# Altium footprint library WCAP-AIG5.PcbLib: 22 footprints (part 1 of 2)
Each footprint in its own frame and in the unit in brackets; x right, y up, seen from the top. Pads: shape width x height; smd on the part's side, far side on the other; paste and mask are expansions set on the pad; w line width, h text height; cw(c..) or ccw(c..) is an arc to the next point about the centre after c.
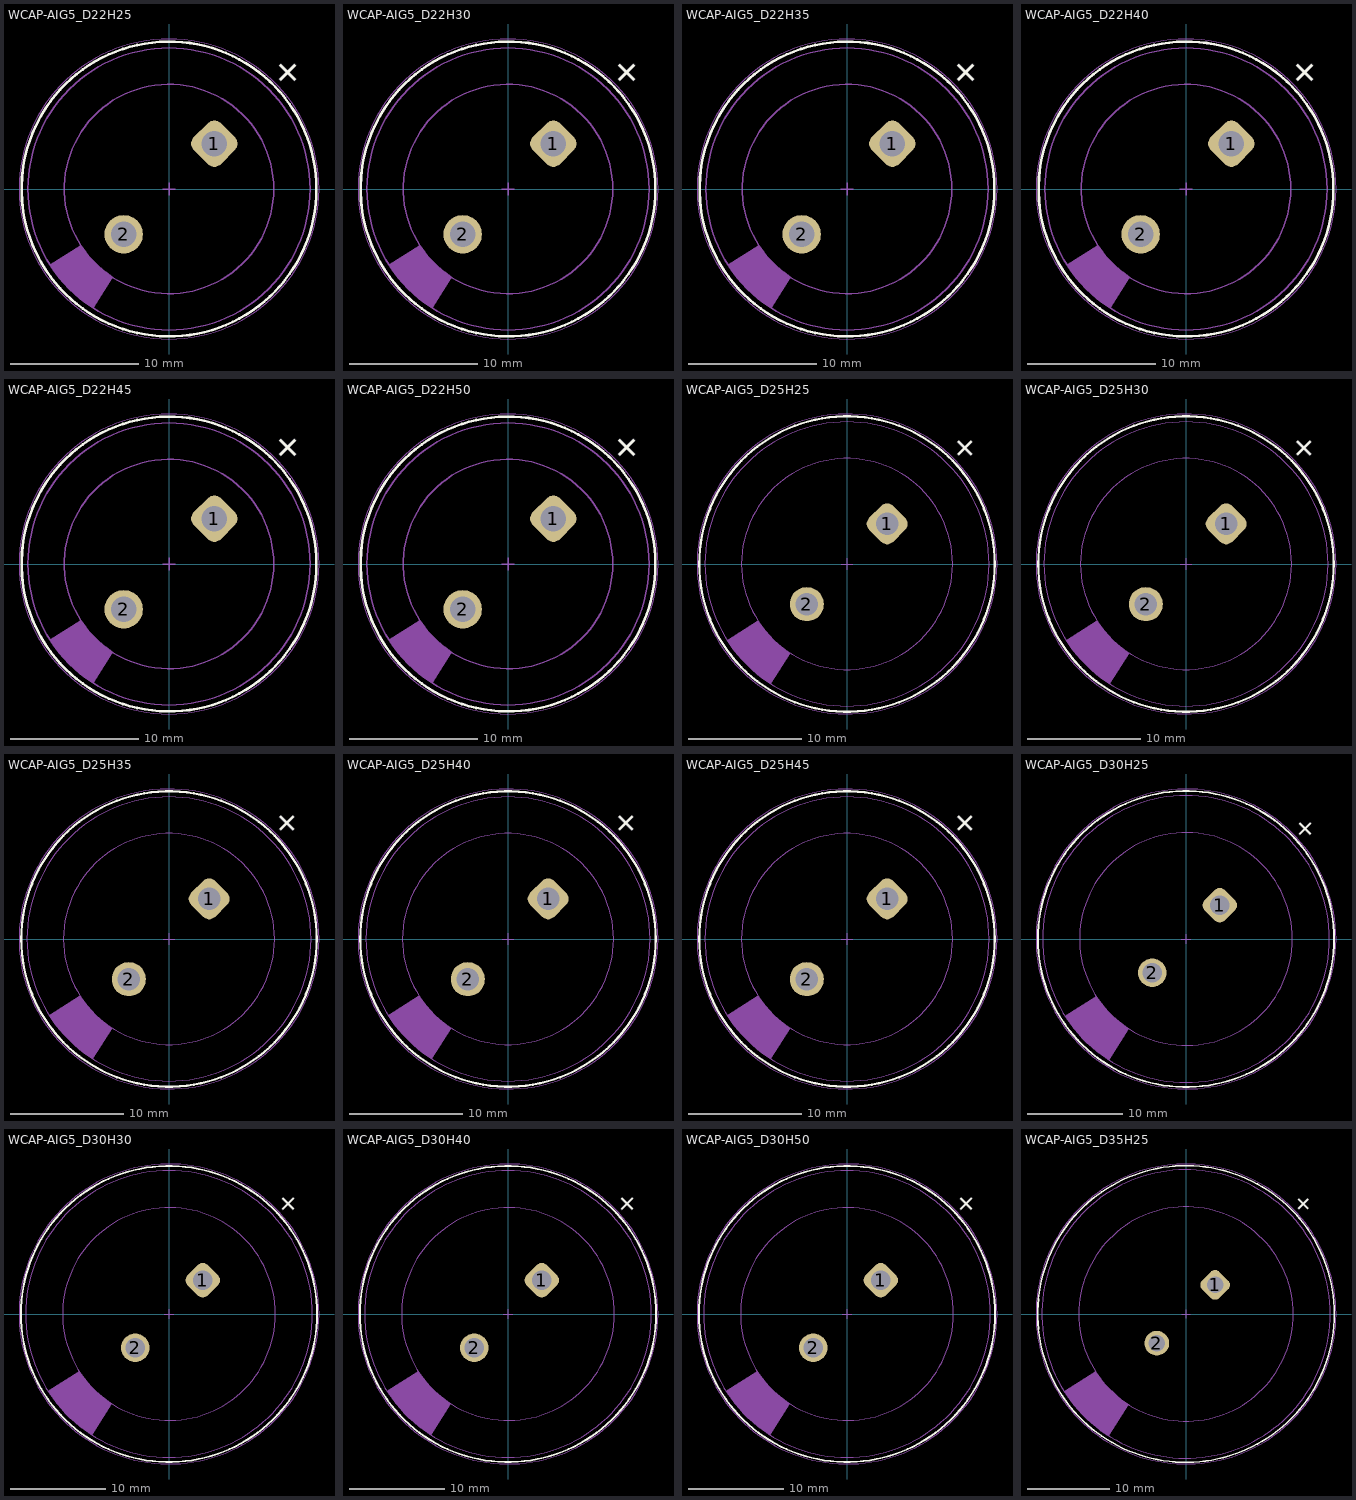
[diagram p0: the footprints below, top view; thin cyan lines are the x and y axes]

## WCAP-AIG5_D22H25 [mm] "Aluminium Electrolytic Snap-In Capacitors"
height 25
pads (2):
  rrect50% 3x3 hole 2 rot 45: 1(3.536,3.536)
  round 3 hole 2: 2(-3.536,-3.536)
Top Overlay:
  circle w0.2: c0,0 r11.5
  text "+" at 9.086,7.672 h2
Top Assembly:
  circle w0.1: c0,0 r11
  circle w0.1: c0,0 r8.17
  region: -5.901,-9.283 -4.381,-6.896 -4.383,-6.895 -4.754,-6.645 -5.452,-6.085 -6.085,-5.452 -6.645,-4.754 -6.895,-4.383 -6.896,-4.381 -9.283,-5.901 -9.121,-6.156 -8.771,-6.646 -8.394,-7.116 -7.991,-7.565 -7.565,-7.991 -7.116,-8.394 -6.646,-8.771 -6.156,-9.121
Top Designator:
  text ".Designator" at -3.647,-0.357 h1
Top 3D Body:
  circle w0.1: c0,0 r11
  circle w0.1: c0,0 r8.17
  region: -5.901,-9.283 -4.381,-6.896 -4.383,-6.895 -4.754,-6.645 -5.452,-6.085 -6.085,-5.452 -6.645,-4.754 -6.895,-4.383 -6.896,-4.381 -9.283,-5.901 -9.121,-6.156 -8.771,-6.646 -8.394,-7.116 -7.991,-7.565 -7.565,-7.991 -7.116,-8.394 -6.646,-8.771 -6.156,-9.121
Top Courtyard:
  circle w0.05: c0,0 r11.7
Top Component Center:
  lines w0.1: -0.5,0 0.5,0 ; 0,-0.5 0,0.5
3D body "WCAP-AIG5_22x25.stp": height 25.09, standoff -6.05, extent -10.995,-11.001 11,10.999

## WCAP-AIG5_D22H30 [mm] "Aluminium Electrolytic Snap-In Capacitors"
height 30
pads (2):
  rrect50% 3x3 hole 2 rot 45: 1(3.536,3.536)
  round 3 hole 2: 2(-3.536,-3.536)
Top Overlay:
  circle w0.2: c0,0 r11.5
  text "+" at 9.086,7.672 h2
Top Assembly:
  circle w0.1: c0,0 r8.17
  circle w0.1: c0,0 r11
  region: -5.901,-9.283 -4.381,-6.896 -4.383,-6.895 -4.754,-6.645 -5.452,-6.085 -6.085,-5.452 -6.645,-4.754 -6.895,-4.383 -6.896,-4.381 -9.283,-5.901 -9.121,-6.156 -8.771,-6.646 -8.394,-7.116 -7.991,-7.565 -7.565,-7.991 -7.116,-8.394 -6.646,-8.771 -6.156,-9.121
Top Designator:
  text ".Designator" at -3.647,-0.357 h1
Top 3D Body:
  circle w0.1: c0,0 r8.17
  circle w0.1: c0,0 r11
  region: -5.901,-9.283 -4.381,-6.896 -4.383,-6.895 -4.754,-6.645 -5.452,-6.085 -6.085,-5.452 -6.645,-4.754 -6.895,-4.383 -6.896,-4.381 -9.283,-5.901 -9.121,-6.156 -8.771,-6.646 -8.394,-7.116 -7.991,-7.565 -7.565,-7.991 -7.116,-8.394 -6.646,-8.771 -6.156,-9.121
Top Courtyard:
  circle w0.05: c0,0 r11.7
Top Component Center:
  lines w0.1: -0.5,0 0.5,0 ; 0,-0.5 0,0.5
3D body "22x30.stp": height 30.09, standoff -6.05, extent -10.999,-11.002 10.988,10.992

## WCAP-AIG5_D22H35 [mm] "Aluminium Electrolytic Snap-In Capacitors"
height 35
pads (2):
  rrect50% 3x3 hole 2 rot 45: 1(3.536,3.536)
  round 3 hole 2: 2(-3.536,-3.536)
Top Overlay:
  circle w0.2: c0,0 r11.5
  text "+" at 9.086,7.672 h2
Top Assembly:
  circle w0.1: c0,0 r11
  circle w0.1: c0,0 r8.17
  region: -5.901,-9.283 -4.381,-6.896 -4.383,-6.895 -4.754,-6.645 -5.452,-6.085 -6.085,-5.452 -6.645,-4.754 -6.895,-4.383 -6.896,-4.381 -9.283,-5.901 -9.121,-6.156 -8.771,-6.646 -8.394,-7.116 -7.991,-7.565 -7.565,-7.991 -7.116,-8.394 -6.646,-8.771 -6.156,-9.121
Top Designator:
  text ".Designator" at -3.647,-0.357 h1
Top 3D Body:
  circle w0.1: c0,0 r11
  circle w0.1: c0,0 r8.17
  region: -5.901,-9.283 -4.381,-6.896 -4.383,-6.895 -4.754,-6.645 -5.452,-6.085 -6.085,-5.452 -6.645,-4.754 -6.895,-4.383 -6.896,-4.381 -9.283,-5.901 -9.121,-6.156 -8.771,-6.646 -8.394,-7.116 -7.991,-7.565 -7.565,-7.991 -7.116,-8.394 -6.646,-8.771 -6.156,-9.121
Top Courtyard:
  circle w0.05: c0,0 r11.7
Top Component Center:
  lines w0.1: -0.5,0 0.5,0 ; 0,-0.5 0,0.5
3D body "WCAP-AIG5_22x35.stp": height 35.09, standoff -6.05, extent -10.988,-11.001 10.98,10.985

## WCAP-AIG5_D22H40 [mm] "Aluminium Electrolytic Snap-In Capacitors"
height 40
pads (2):
  rrect50% 3x3 hole 2 rot 45: 1(3.536,3.536)
  round 3 hole 2: 2(-3.536,-3.536)
Top Overlay:
  circle w0.2: c0,0 r11.5
  text "+" at 9.086,7.672 h2
Top Assembly:
  circle w0.1: c0,0 r11
  circle w0.1: c0,0 r8.17
  region: -5.901,-9.283 -4.381,-6.896 -4.383,-6.895 -4.754,-6.645 -5.452,-6.085 -6.085,-5.452 -6.645,-4.754 -6.895,-4.383 -6.896,-4.381 -9.283,-5.901 -9.121,-6.156 -8.771,-6.646 -8.394,-7.116 -7.991,-7.565 -7.565,-7.991 -7.116,-8.394 -6.646,-8.771 -6.156,-9.121
Top Designator:
  text ".Designator" at -3.647,-0.357 h1
Top 3D Body:
  circle w0.1: c0,0 r11
  circle w0.1: c0,0 r8.17
  region: -5.901,-9.283 -4.381,-6.896 -4.383,-6.895 -4.754,-6.645 -5.452,-6.085 -6.085,-5.452 -6.645,-4.754 -6.895,-4.383 -6.896,-4.381 -9.283,-5.901 -9.121,-6.156 -8.771,-6.646 -8.394,-7.116 -7.991,-7.565 -7.565,-7.991 -7.116,-8.394 -6.646,-8.771 -6.156,-9.121
Top Courtyard:
  circle w0.05: c0,0 r11.7
Top Component Center:
  lines w0.1: -0.5,0 0.5,0 ; 0,-0.5 0,0.5
3D body "WCAP-AIG5_22x40.stp": height 40.09, standoff -6.05, extent -10.99,-11 10.985,10.98

## WCAP-AIG5_D22H45 [mm] "Aluminium Electrolytic Snap-In Capacitors"
height 45
pads (2):
  rrect50% 3x3 hole 2 rot 45: 1(3.536,3.536)
  round 3 hole 2: 2(-3.536,-3.536)
Top Overlay:
  circle w0.2: c0,0 r11.5
  text "+" at 9.086,7.672 h2
Top Assembly:
  circle w0.1: c0,0 r8.17
  circle w0.1: c0,0 r11
  region: -5.901,-9.283 -4.381,-6.896 -4.383,-6.895 -4.754,-6.645 -5.452,-6.085 -6.085,-5.452 -6.645,-4.754 -6.895,-4.383 -6.896,-4.381 -9.283,-5.901 -9.121,-6.156 -8.771,-6.646 -8.394,-7.116 -7.991,-7.565 -7.565,-7.991 -7.116,-8.394 -6.646,-8.771 -6.156,-9.121
Top Designator:
  text ".Designator" at -3.647,-0.357 h1
Top 3D Body:
  circle w0.1: c0,0 r8.17
  circle w0.1: c0,0 r11
  region: -5.901,-9.283 -4.381,-6.896 -4.383,-6.895 -4.754,-6.645 -5.452,-6.085 -6.085,-5.452 -6.645,-4.754 -6.895,-4.383 -6.896,-4.381 -9.283,-5.901 -9.121,-6.156 -8.771,-6.646 -8.394,-7.116 -7.991,-7.565 -7.565,-7.991 -7.116,-8.394 -6.646,-8.771 -6.156,-9.121
Top Courtyard:
  circle w0.05: c0,0 r11.7
Top Component Center:
  lines w0.1: -0.5,0 0.5,0 ; 0,-0.5 0,0.5
3D body "22x45.stp": height 45.09, standoff -6.05, extent -10.998,-11 10.989,10.993

## WCAP-AIG5_D22H50 [mm] "Aluminium Electrolytic Snap-In Capacitors"
height 50
pads (2):
  rrect50% 3x3 hole 2 rot 45: 1(3.536,3.536)
  round 3 hole 2: 2(-3.536,-3.536)
Top Overlay:
  circle w0.2: c0,0 r11.5
  text "+" at 9.086,7.672 h2
Top Assembly:
  circle w0.1: c0,0 r8.17
  circle w0.1: c0,0 r11
  region: -5.901,-9.283 -4.381,-6.896 -4.383,-6.895 -4.754,-6.645 -5.452,-6.085 -6.085,-5.452 -6.645,-4.754 -6.895,-4.383 -6.896,-4.381 -9.283,-5.901 -9.121,-6.156 -8.771,-6.646 -8.394,-7.116 -7.991,-7.565 -7.565,-7.991 -7.116,-8.394 -6.646,-8.771 -6.156,-9.121
Top Designator:
  text ".Designator" at -3.647,-0.357 h1
Top 3D Body:
  circle w0.1: c0,0 r8.17
  circle w0.1: c0,0 r11
  region: -5.901,-9.283 -4.381,-6.896 -4.383,-6.895 -4.754,-6.645 -5.452,-6.085 -6.085,-5.452 -6.645,-4.754 -6.895,-4.383 -6.896,-4.381 -9.283,-5.901 -9.121,-6.156 -8.771,-6.646 -8.394,-7.116 -7.991,-7.565 -7.565,-7.991 -7.116,-8.394 -6.646,-8.771 -6.156,-9.121
Top Courtyard:
  circle w0.05: c0,0 r11.7
Top Component Center:
  lines w0.1: -0.5,0 0.5,0 ; 0,-0.5 0,0.5
3D body "22x50.stp": height 50.09, standoff -6.05, extent -11,-11.002 11,11

## WCAP-AIG5_D25H25 [mm] "Aluminium Electrolytic Snap-In Capacitors"
height 25
pads (2):
  rrect50% 3x3 hole 2 rot 45: 1(3.536,3.536)
  round 3 hole 2: 2(-3.536,-3.536)
Top Overlay:
  circle w0.2: c0,0 r13
  text "+" at 10.182,8.768 h2
Top Assembly:
  circle w0.1: c0,0 r9.29
  circle w0.1: c0,0 r12.5
  region: -6.717,-10.542 -4.978,-7.844 -4.983,-7.84 -5.196,-7.701 -5.61,-7.405 -6.007,-7.086 -6.387,-6.747 -6.747,-6.387 -7.086,-6.007 -7.405,-5.61 -7.701,-5.196 -7.84,-4.983 -7.844,-4.978 -10.542,-6.717 -10.359,-7.005 -9.962,-7.559 -9.535,-8.09 -9.08,-8.598 -8.598,-9.08 -8.09,-9.535 -7.559,-9.962 -7.005,-10.359
Top Designator:
  text ".Designator" at -3.647,-0.357 h1
Top 3D Body:
  circle w0.1: c0,0 r9.29
  circle w0.1: c0,0 r12.5
  region: -6.717,-10.542 -4.978,-7.844 -4.983,-7.84 -5.196,-7.701 -5.61,-7.405 -6.007,-7.086 -6.387,-6.747 -6.747,-6.387 -7.086,-6.007 -7.405,-5.61 -7.701,-5.196 -7.84,-4.983 -7.844,-4.978 -10.542,-6.717 -10.359,-7.005 -9.962,-7.559 -9.535,-8.09 -9.08,-8.598 -8.598,-9.08 -8.09,-9.535 -7.559,-9.962 -7.005,-10.359
Top Courtyard:
  circle w0.05: c0,0 r13.2
Top Component Center:
  lines w0.1: -0.5,0 0.5,0 ; 0,-0.5 0,0.5
3D body "WCAP-AIG5_25x25.stp": height 25.09, standoff -6.05, extent -12.494,-12.5 12.485,12.49

## WCAP-AIG5_D25H30 [mm] "Aluminium Electrolytic Snap-In Capacitors"
height 30
pads (2):
  rrect50% 3x3 hole 2 rot 45: 1(3.536,3.536)
  round 3 hole 2: 2(-3.536,-3.536)
Top Overlay:
  circle w0.2: c0,0 r13
  text "+" at 10.182,8.768 h2
Top Assembly:
  circle w0.1: c0,0 r12.5
  circle w0.1: c0,0 r9.29
  region: -6.717,-10.542 -4.978,-7.844 -4.983,-7.84 -5.196,-7.701 -5.61,-7.405 -6.007,-7.086 -6.387,-6.747 -6.747,-6.387 -7.086,-6.007 -7.405,-5.61 -7.701,-5.196 -7.84,-4.983 -7.844,-4.978 -10.542,-6.717 -10.359,-7.005 -9.962,-7.559 -9.535,-8.09 -9.08,-8.598 -8.598,-9.08 -8.09,-9.535 -7.559,-9.962 -7.005,-10.359
Top Designator:
  text ".Designator" at -3.647,-0.357 h1
Top 3D Body:
  circle w0.1: c0,0 r12.5
  circle w0.1: c0,0 r9.29
  region: -6.717,-10.542 -4.978,-7.844 -4.983,-7.84 -5.196,-7.701 -5.61,-7.405 -6.007,-7.086 -6.387,-6.747 -6.747,-6.387 -7.086,-6.007 -7.405,-5.61 -7.701,-5.196 -7.84,-4.983 -7.844,-4.978 -10.542,-6.717 -10.359,-7.005 -9.962,-7.559 -9.535,-8.09 -9.08,-8.598 -8.598,-9.08 -8.09,-9.535 -7.559,-9.962 -7.005,-10.359
Top Courtyard:
  circle w0.05: c0,0 r13.2
Top Component Center:
  lines w0.1: -0.5,0 0.5,0 ; 0,-0.5 0,0.5
3D body "25x30.stp": height 30.09, standoff -6.05, extent -12.494,-12.501 12.499,12.499

## WCAP-AIG5_D25H35 [mm] "Aluminium Electrolytic Snap-In Capacitors"
height 35
pads (2):
  rrect50% 3x3 hole 2 rot 45: 1(3.536,3.536)
  round 3 hole 2: 2(-3.536,-3.536)
Top Overlay:
  circle w0.2: c0,0 r13
  text "+" at 10.182,8.768 h2
Top Assembly:
  circle w0.1: c0,0 r12.5
  circle w0.1: c0,0 r9.29
  region: -6.717,-10.542 -4.978,-7.844 -4.983,-7.84 -5.196,-7.701 -5.61,-7.405 -6.007,-7.086 -6.387,-6.747 -6.747,-6.387 -7.086,-6.007 -7.405,-5.61 -7.701,-5.196 -7.84,-4.983 -7.844,-4.978 -10.542,-6.717 -10.359,-7.005 -9.962,-7.559 -9.535,-8.09 -9.08,-8.598 -8.598,-9.08 -8.09,-9.535 -7.559,-9.962 -7.005,-10.359
Top Designator:
  text ".Designator" at -3.647,-0.357 h1
Top 3D Body:
  circle w0.1: c0,0 r12.5
  circle w0.1: c0,0 r9.29
  region: -6.717,-10.542 -4.978,-7.844 -4.983,-7.84 -5.196,-7.701 -5.61,-7.405 -6.007,-7.086 -6.387,-6.747 -6.747,-6.387 -7.086,-6.007 -7.405,-5.61 -7.701,-5.196 -7.84,-4.983 -7.844,-4.978 -10.542,-6.717 -10.359,-7.005 -9.962,-7.559 -9.535,-8.09 -9.08,-8.598 -8.598,-9.08 -8.09,-9.535 -7.559,-9.962 -7.005,-10.359
Top Courtyard:
  circle w0.05: c0,0 r13.2
Top Component Center:
  lines w0.1: -0.5,0 0.5,0 ; 0,-0.5 0,0.5
3D body "25x35.stp": height 35.09, standoff -6.05, extent -12.5,-12.5 12.486,12.491

## WCAP-AIG5_D25H40 [mm] "Aluminium Electrolytic Snap-In Capacitors"
height 40
pads (2):
  rrect50% 3x3 hole 2 rot 45: 1(3.536,3.536)
  round 3 hole 2: 2(-3.536,-3.536)
Top Overlay:
  circle w0.2: c0,0 r13
  text "+" at 10.182,8.768 h2
Top Assembly:
  circle w0.1: c0,0 r12.5
  circle w0.1: c0,0 r9.29
  region: -6.717,-10.542 -4.978,-7.844 -4.983,-7.84 -5.196,-7.701 -5.61,-7.405 -6.007,-7.086 -6.387,-6.747 -6.747,-6.387 -7.086,-6.007 -7.405,-5.61 -7.701,-5.196 -7.84,-4.983 -7.844,-4.978 -10.542,-6.717 -10.359,-7.005 -9.962,-7.559 -9.535,-8.09 -9.08,-8.598 -8.598,-9.08 -8.09,-9.535 -7.559,-9.962 -7.005,-10.359
Top Designator:
  text ".Designator" at -3.647,-0.357 h1
Top 3D Body:
  circle w0.1: c0,0 r12.5
  circle w0.1: c0,0 r9.29
  region: -6.717,-10.542 -4.978,-7.844 -4.983,-7.84 -5.196,-7.701 -5.61,-7.405 -6.007,-7.086 -6.387,-6.747 -6.747,-6.387 -7.086,-6.007 -7.405,-5.61 -7.701,-5.196 -7.84,-4.983 -7.844,-4.978 -10.542,-6.717 -10.359,-7.005 -9.962,-7.559 -9.535,-8.09 -9.08,-8.598 -8.598,-9.08 -8.09,-9.535 -7.559,-9.962 -7.005,-10.359
Top Courtyard:
  circle w0.05: c0,0 r13.2
Top Component Center:
  lines w0.1: -0.5,0 0.5,0 ; 0,-0.5 0,0.5
3D body "25x40.stp": height 40.09, standoff -6.05, extent -12.487,-12.5 12.477,12.482

## WCAP-AIG5_D25H45 [mm] "Aluminium Electrolytic Snap-In Capacitors"
height 45
pads (2):
  rrect50% 3x3 hole 2 rot 45: 1(3.536,3.536)
  round 3 hole 2: 2(-3.536,-3.536)
Top Overlay:
  circle w0.2: c0,0 r13
  text "+" at 10.182,8.768 h2
Top Assembly:
  circle w0.1: c0,0 r9.29
  circle w0.1: c0,0 r12.5
  region: -6.717,-10.542 -4.978,-7.844 -4.983,-7.84 -5.196,-7.701 -5.61,-7.405 -6.007,-7.086 -6.387,-6.747 -6.747,-6.387 -7.086,-6.007 -7.405,-5.61 -7.701,-5.196 -7.84,-4.983 -7.844,-4.978 -10.542,-6.717 -10.359,-7.005 -9.962,-7.559 -9.535,-8.09 -9.08,-8.598 -8.598,-9.08 -8.09,-9.535 -7.559,-9.962 -7.005,-10.359
Top Designator:
  text ".Designator" at -3.647,-0.357 h1
Top 3D Body:
  circle w0.1: c0,0 r9.29
  circle w0.1: c0,0 r12.5
  region: -6.717,-10.542 -4.978,-7.844 -4.983,-7.84 -5.196,-7.701 -5.61,-7.405 -6.007,-7.086 -6.387,-6.747 -6.747,-6.387 -7.086,-6.007 -7.405,-5.61 -7.701,-5.196 -7.84,-4.983 -7.844,-4.978 -10.542,-6.717 -10.359,-7.005 -9.962,-7.559 -9.535,-8.09 -9.08,-8.598 -8.598,-9.08 -8.09,-9.535 -7.559,-9.962 -7.005,-10.359
Top Courtyard:
  circle w0.05: c0,0 r13.2
Top Component Center:
  lines w0.1: -0.5,0 0.5,0 ; 0,-0.5 0,0.5
3D body "25x45.stp": height 45.09, standoff -6.05, extent -12.482,-12.501 12.494,12.497

## WCAP-AIG5_D30H25 [mm] "Aluminium Electrolytic Snap-In Capacitors"
height 25
pads (2):
  rrect50% 3x3 hole 2 rot 45: 1(3.536,3.536)
  round 3 hole 2: 2(-3.536,-3.536)
Top Overlay:
  circle w0.2: c0,0 r15.5
  text "+" at 12.268,10.147 h2
Top Assembly:
  circle w0.1: c0,0 r11.14
  circle w0.1: c0,0 r15
  region: -8.056,-12.653 -5.976,-9.401 -5.977,-9.401 -6.232,-9.233 -6.728,-8.879 -7.204,-8.497 -7.659,-8.09 -8.09,-7.659 -8.497,-7.204 -8.879,-6.728 -9.233,-6.232 -9.401,-5.977 -9.401,-5.976 -12.653,-8.056 -12.433,-8.401 -11.956,-9.068 -11.443,-9.707 -10.896,-10.317 -10.317,-10.896 -9.707,-11.443 -9.068,-11.956 -8.401,-12.433
Top Designator:
  text ".Designator" at -3.647,-0.357 h1
Top 3D Body:
  circle w0.1: c0,0 r11.14
  circle w0.1: c0,0 r15
  region: -8.056,-12.653 -5.976,-9.401 -5.977,-9.401 -6.232,-9.233 -6.728,-8.879 -7.204,-8.497 -7.659,-8.09 -8.09,-7.659 -8.497,-7.204 -8.879,-6.728 -9.233,-6.232 -9.401,-5.977 -9.401,-5.976 -12.653,-8.056 -12.433,-8.401 -11.956,-9.068 -11.443,-9.707 -10.896,-10.317 -10.317,-10.896 -9.707,-11.443 -9.068,-11.956 -8.401,-12.433
Top Courtyard:
  circle w0.05: c0,0 r15.7
Top Component Center:
  lines w0.1: -0.5,0 0.5,0 ; 0,-0.5 0,0.5
3D body "30x25.stp": height 25.09, standoff -6.05, extent -15,-15 14.999,15

## WCAP-AIG5_D30H30 [mm] "Aluminium Electrolytic Snap-In Capacitors"
height 30
pads (2):
  rrect50% 3x3 hole 2 rot 45: 1(3.536,3.536)
  round 3 hole 2: 2(-3.536,-3.536)
Top Overlay:
  circle w0.2: c0,0 r15.5
  text "+" at 12.268,10.147 h2
Top Assembly:
  circle w0.1: c0,0 r11.14
  circle w0.1: c0,0 r15
  region: -8.056,-12.653 -5.976,-9.401 -5.977,-9.401 -6.232,-9.233 -6.728,-8.879 -7.204,-8.497 -7.659,-8.09 -8.09,-7.659 -8.497,-7.204 -8.879,-6.728 -9.233,-6.232 -9.401,-5.977 -9.401,-5.976 -12.653,-8.056 -12.433,-8.401 -11.956,-9.068 -11.443,-9.707 -10.896,-10.317 -10.317,-10.896 -9.707,-11.443 -9.068,-11.956 -8.401,-12.433
Top Designator:
  text ".Designator" at -3.647,-0.357 h1
Top 3D Body:
  circle w0.1: c0,0 r11.14
  circle w0.1: c0,0 r15
  region: -8.056,-12.653 -5.976,-9.401 -5.977,-9.401 -6.232,-9.233 -6.728,-8.879 -7.204,-8.497 -7.659,-8.09 -8.09,-7.659 -8.497,-7.204 -8.879,-6.728 -9.233,-6.232 -9.401,-5.977 -9.401,-5.976 -12.653,-8.056 -12.433,-8.401 -11.956,-9.068 -11.443,-9.707 -10.896,-10.317 -10.317,-10.896 -9.707,-11.443 -9.068,-11.956 -8.401,-12.433
Top Courtyard:
  circle w0.05: c0,0 r15.7
Top Component Center:
  lines w0.1: -0.5,0 0.5,0 ; 0,-0.5 0,0.5
3D body "WCAP-AIG5_30x30.stp": height 30.09, standoff -6.05, extent -14.997,-15 14.998,15

## WCAP-AIG5_D30H40 [mm] "Aluminium Electrolytic Snap-In Capacitors"
height 40
pads (2):
  rrect50% 3x3 hole 2 rot 45: 1(3.536,3.536)
  round 3 hole 2: 2(-3.536,-3.536)
Top Overlay:
  circle w0.2: c0,0 r15.5
  text "+" at 12.268,10.147 h2
Top Assembly:
  circle w0.1: c0,0 r15
  circle w0.1: c0,0 r11.14
  region: -8.056,-12.653 -5.976,-9.401 -5.977,-9.401 -6.232,-9.233 -6.728,-8.879 -7.204,-8.497 -7.659,-8.09 -8.09,-7.659 -8.497,-7.204 -8.879,-6.728 -9.233,-6.232 -9.401,-5.977 -9.401,-5.976 -12.653,-8.056 -12.433,-8.401 -11.956,-9.068 -11.443,-9.707 -10.896,-10.317 -10.317,-10.896 -9.707,-11.443 -9.068,-11.956 -8.401,-12.433
Top Designator:
  text ".Designator" at -3.647,-0.357 h1
Top 3D Body:
  circle w0.1: c0,0 r15
  circle w0.1: c0,0 r11.14
  region: -8.056,-12.653 -5.976,-9.401 -5.977,-9.401 -6.232,-9.233 -6.728,-8.879 -7.204,-8.497 -7.659,-8.09 -8.09,-7.659 -8.497,-7.204 -8.879,-6.728 -9.233,-6.232 -9.401,-5.977 -9.401,-5.976 -12.653,-8.056 -12.433,-8.401 -11.956,-9.068 -11.443,-9.707 -10.896,-10.317 -10.317,-10.896 -9.707,-11.443 -9.068,-11.956 -8.401,-12.433
Top Courtyard:
  circle w0.05: c0,0 r15.7
Top Component Center:
  lines w0.1: -0.5,0 0.5,0 ; 0,-0.5 0,0.5
3D body "WCAP-AIG5_30x40.stp": height 40.09, standoff -6.05, extent -15,-15 14.99,14.986

## WCAP-AIG5_D30H50 [mm] "Aluminium Electrolytic Snap-In Capacitors"
height 50
pads (2):
  rrect50% 3x3 hole 2 rot 45: 1(3.536,3.536)
  round 3 hole 2: 2(-3.536,-3.536)
Top Overlay:
  circle w0.2: c0,0 r15.5
  text "+" at 12.268,10.147 h2
Top Assembly:
  circle w0.1: c0,0 r15
  circle w0.1: c0,0 r11.14
  region: -8.056,-12.653 -5.976,-9.401 -5.977,-9.401 -6.232,-9.233 -6.728,-8.879 -7.204,-8.497 -7.659,-8.09 -8.09,-7.659 -8.497,-7.204 -8.879,-6.728 -9.233,-6.232 -9.401,-5.977 -9.401,-5.976 -12.653,-8.056 -12.433,-8.401 -11.956,-9.068 -11.443,-9.707 -10.896,-10.317 -10.317,-10.896 -9.707,-11.443 -9.068,-11.956 -8.401,-12.433
Top Designator:
  text ".Designator" at -3.647,-0.357 h1
Top 3D Body:
  circle w0.1: c0,0 r15
  circle w0.1: c0,0 r11.14
  region: -8.056,-12.653 -5.976,-9.401 -5.977,-9.401 -6.232,-9.233 -6.728,-8.879 -7.204,-8.497 -7.659,-8.09 -8.09,-7.659 -8.497,-7.204 -8.879,-6.728 -9.233,-6.232 -9.401,-5.977 -9.401,-5.976 -12.653,-8.056 -12.433,-8.401 -11.956,-9.068 -11.443,-9.707 -10.896,-10.317 -10.317,-10.896 -9.707,-11.443 -9.068,-11.956 -8.401,-12.433
Top Courtyard:
  circle w0.05: c0,0 r15.7
Top Component Center:
  lines w0.1: -0.5,0 0.5,0 ; 0,-0.5 0,0.5
3D body "30x50.stp": height 50.09, standoff -6.05, extent -14.985,-15 14.972,14.979

## WCAP-AIG5_D35H25 [mm] "Aluminium Electrolytic Snap-In Capacitors"
height 25
pads (2):
  rrect50% 3x3 hole 2 rot 45: 1(3.536,3.536)
  round 3 hole 2: 2(-3.536,-3.536)
Top Overlay:
  circle w0.2: c0,0 r18
  text "+" at 14.036,11.915 h2
Top Assembly:
  circle w0.1: c0,0 r13
  circle w0.1: c0,0 r17.5
  region: -9.394,-14.765 -6.977,-10.969 -6.978,-10.968 -7.276,-10.773 -7.854,-10.359 -8.408,-9.915 -8.938,-9.44 -9.44,-8.938 -9.915,-8.408 -10.359,-7.854 -10.773,-7.276 -10.968,-6.978 -10.969,-6.977 -14.765,-9.394 -14.508,-9.798 -13.951,-10.576 -13.352,-11.323 -12.713,-12.036 -12.036,-12.713 -11.323,-13.352 -10.576,-13.951 -9.798,-14.508
Top Designator:
  text ".Designator" at -3.647,-0.357 h1
Top 3D Body:
  circle w0.1: c0,0 r13
  circle w0.1: c0,0 r17.5
  region: -9.394,-14.765 -6.977,-10.969 -6.978,-10.968 -7.276,-10.773 -7.854,-10.359 -8.408,-9.915 -8.938,-9.44 -9.44,-8.938 -9.915,-8.408 -10.359,-7.854 -10.773,-7.276 -10.968,-6.978 -10.969,-6.977 -14.765,-9.394 -14.508,-9.798 -13.951,-10.576 -13.352,-11.323 -12.713,-12.036 -12.036,-12.713 -11.323,-13.352 -10.576,-13.951 -9.798,-14.508
Top Courtyard:
  circle w0.05: c0,0 r18.2
Top Component Center:
  lines w0.1: -0.5,0 0.5,0 ; 0,-0.5 0,0.5
3D body "35x25.stp": height 25.09, standoff -6.05, extent -17.5,-17.5 17.5,17.5